# Altium footprint library R40N3011851012.PcbLib: 1 footprints
Each footprint in its own frame and in the unit in brackets; x right, y up, seen from the top. Pads: shape width x height; smd on the part's side, far side on the other; paste and mask are expansions set on the pad; w line width, h text height; cw(c..) or ccw(c..) is an arc to the next point about the centre after c.
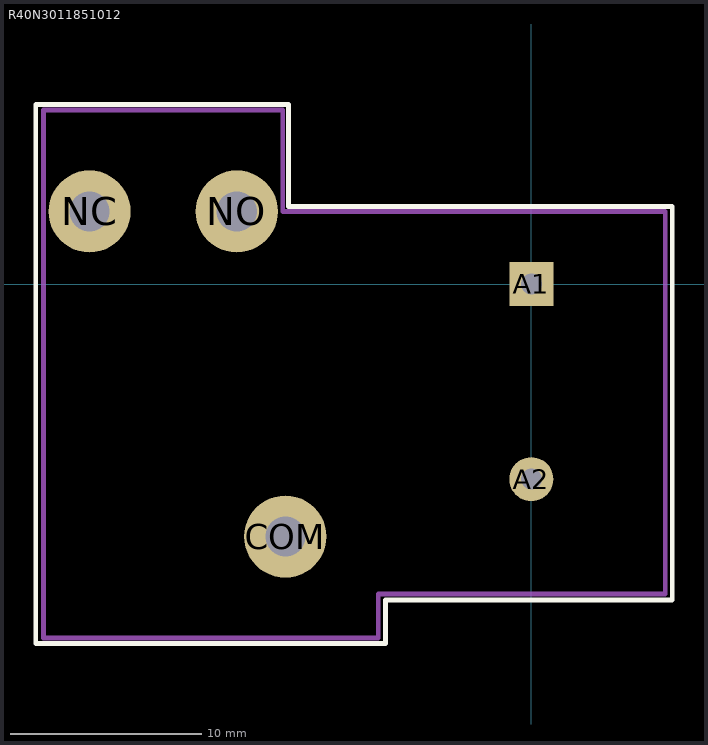
[diagram p0: the footprint, top view; thin cyan lines are the x and y axes]

## R40N3011851012 [mm] "Relay: electromagnetic; Ucoil: 12VDC; SPDT; 40A; max.300VAC; R40N"
height 21
pads (5):
  rect 2.3x2.3 hole 1.1: A1(0,0)
  round 2.3 hole 1.1: A2(0,-10.2)
  round 4.3 hole 2.1: COM(-12.86,-13.2) NC(-23.1,3.8) NO(-15.4,3.8)
Top Overlay:
  lines w0.254: -25.908,-18.796 -7.62,-18.796 -7.62,-16.51 7.366,-16.51 7.366,4.064 -12.7,4.064 -12.7,9.398 -25.908,9.398 -25.908,-18.796
  text ".DESIGNATOR" at -25.842,9.876 h1
Mechanical 1:
  lines w0.254: -25.5,-18.5 -25.5,9.1 -13,9.1 -13,3.8 7,3.8 7,-16.2 -8,-16.2 -8,-18.5 -25.5,-18.5